# EAGLE library part IC8 (library ics)
Generic integrated circuit, 8 pins
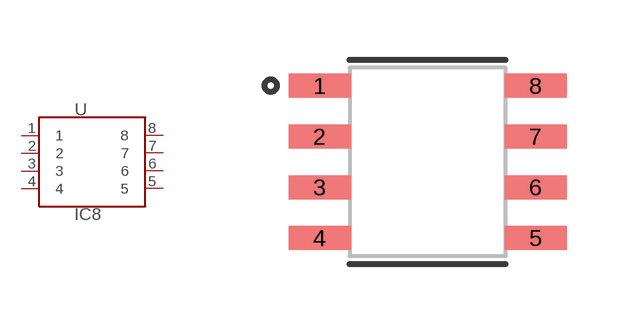
[diagram p0: symbol with the pads of SOIC-8; footprint SOIC-8]

Designator prefix U

## IC8SOIC  [SOIC-8]
1  1  pas
2  2  pas
3  3  pas
4  4  pas
5  5  pas
6  6  pas
7  7  pas
8  8  pas

## Footprint SOIC-8 (pad centres in mm)
Small outline package, 8 pins, pitch 1.27 mm, body 3.9 mm. Sizes: JEDEC MS-012 nominal sizes; pads worked out for this kit. Not verified against a datasheet.
smd 1.55 x 0.6: 1 -2.7,1.905; 2 -2.7,0.635; 3 -2.7,-0.635; 4 -2.7,-1.905; 5 2.7,-1.905; 6 2.7,-0.635; 7 2.7,0.635; 8 2.7,1.905